# Altium footprint library Connectors.PcbLib: 60 footprints (part 3 of 4)
Each footprint in its own frame and in the unit in brackets; x right, y up, seen from the top. Pads: shape width x height; smd on the part's side, far side on the other; paste and mask are expansions set on the pad; w line width, h text height; cw(c..) or ccw(c..) is an arc to the next point about the centre after c.
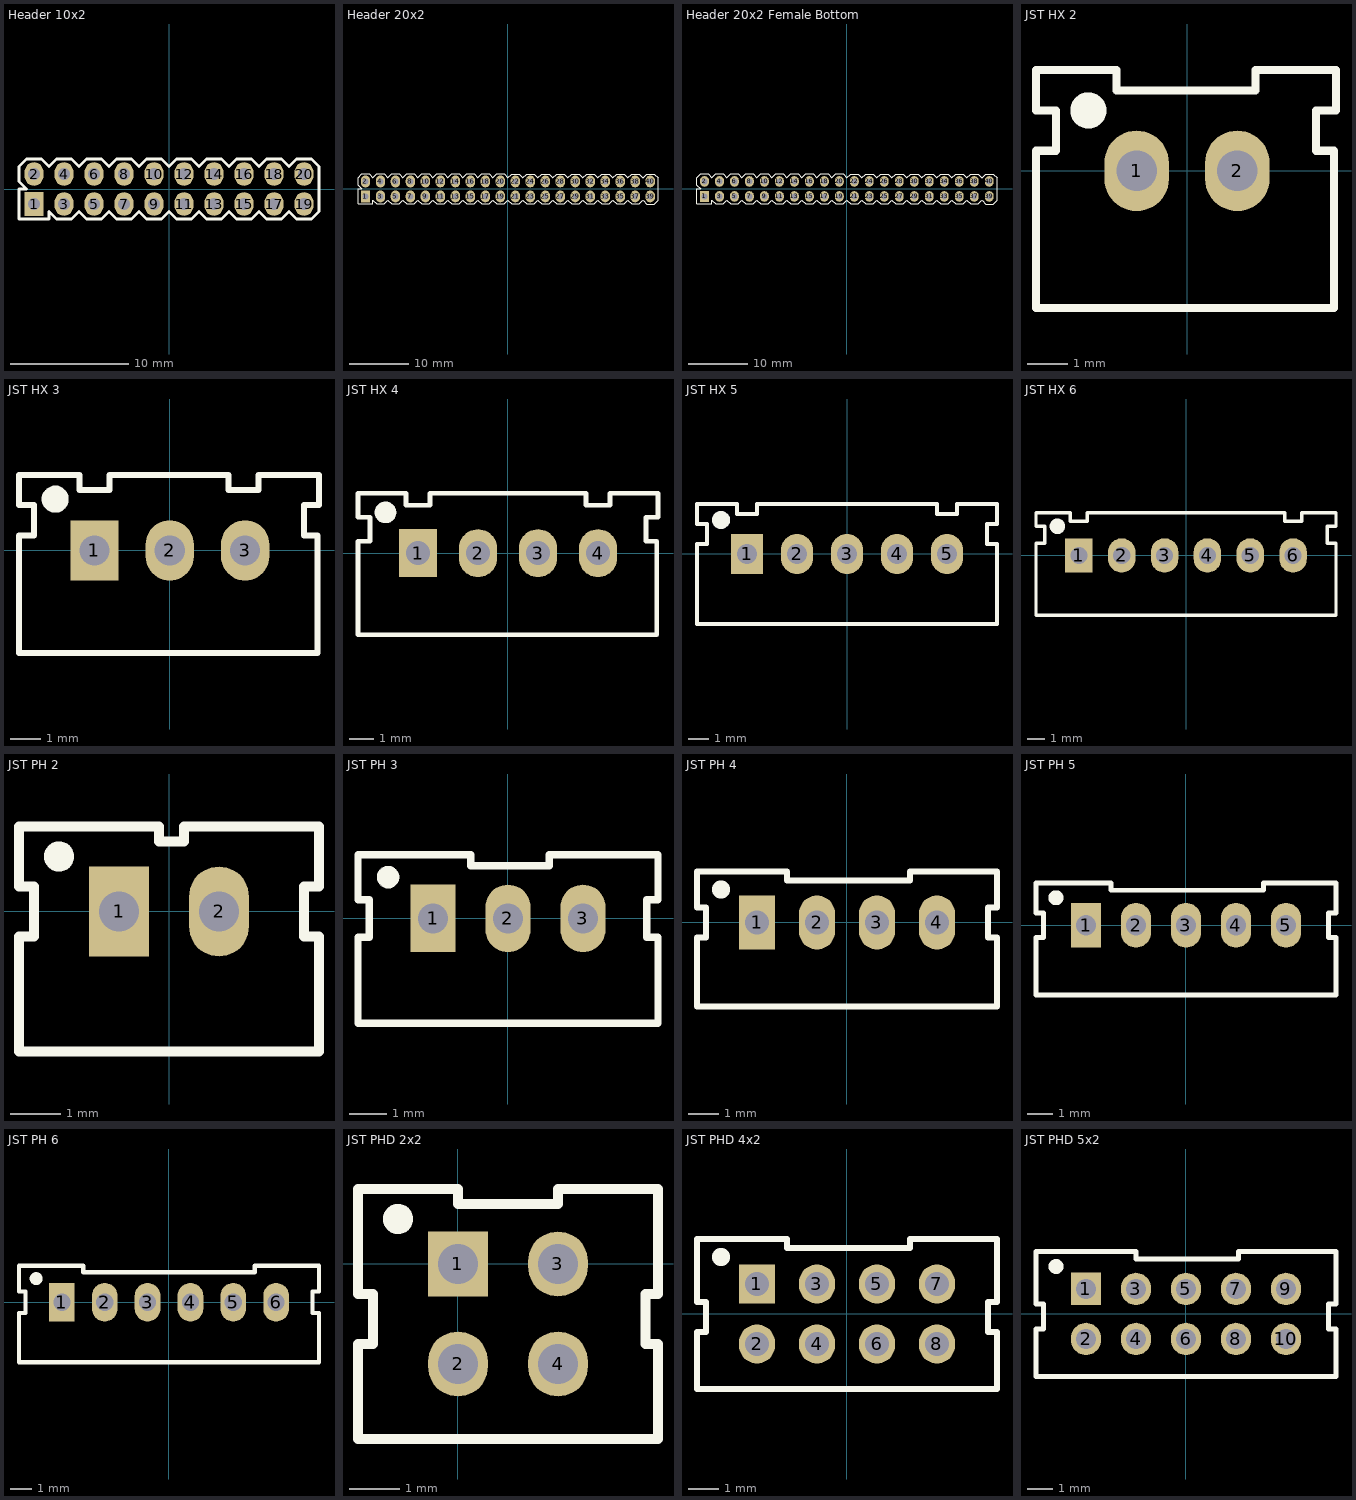
[diagram p2: the footprints below, top view; thin cyan lines are the x and y axes]

## Header 10x2 [mm]
pads (20):
  rect 1.6x2 hole 1: 1(-11.43,-1.27)
  oval 1.6x2 hole 1: 2(-11.43,1.27) 3(-8.89,-1.27) 4(-8.89,1.27) 5(-6.35,-1.27) 6(-6.35,1.27) 7(-3.81,-1.27) 8(-3.81,1.27) 9(-1.27,-1.27) 10(-1.27,1.27) 11(1.27,-1.27) 12(1.27,1.27) 13(3.81,-1.27) 14(3.81,1.27) 15(6.35,-1.27) 16(6.35,1.27) 17(8.89,-1.27) 18(8.89,1.27) 19(11.43,-1.27) 20(11.43,1.27)
Top Overlay:
  lines w0.254: -12.7,-2.54 -10.16,-2.54 -10.16,-1.905 -9.525,-2.54 -8.255,-2.54 -7.62,-1.905 -6.985,-2.54 -5.715,-2.54 -5.08,-1.905 -4.445,-2.54 -3.175,-2.54 -2.54,-1.905 -1.905,-2.54 -0.635,-2.54 0,-1.905 0.635,-2.54 1.905,-2.54 2.54,-1.905 3.175,-2.54 4.445,-2.54 5.08,-1.905 5.715,-2.54 6.985,-2.54 7.62,-1.905 8.255,-2.54 9.525,-2.54 10.16,-1.905 10.795,-2.54 12.065,-2.54 12.7,-1.905 12.7,1.905 12.065,2.54 10.795,2.54 10.16,1.905 9.525,2.54 8.255,2.54 7.62,1.905 6.985,2.54 5.715,2.54 5.08,1.905 4.445,2.54 3.175,2.54 2.54,1.905 1.905,2.54 0.635,2.54 0,1.905 -0.635,2.54 -1.905,2.54 -2.54,1.905 -3.175,2.54 -4.445,2.54 -5.08,1.905 -5.715,2.54 -6.985,2.54 -7.62,1.905 -8.255,2.54 -9.525,2.54 -10.16,1.905 -10.795,2.54 -12.065,2.54 -12.7,1.905 -12.7,0.635 -12.065,0 -12.7,0 -12.7,-2.54
3D body: height 8.5, standoff -3, extent -12.7,-2.54 12.7,2.54

## Header 20x2 [mm]
pads (40):
  rect 1.6x2 hole 1: 1(-24.13,-1.27)
  oval 1.6x2 hole 1: 2(-24.13,1.27) 3(-21.59,-1.27) 4(-21.59,1.27) 5(-19.05,-1.27) 6(-19.05,1.27) 7(-16.51,-1.27) 8(-16.51,1.27) 9(-13.97,-1.27) 10(-13.97,1.27) 11(-11.43,-1.27) 12(-11.43,1.27) 13(-8.89,-1.27) 14(-8.89,1.27) 15(-6.35,-1.27) 16(-6.35,1.27) 17(-3.81,-1.27) 18(-3.81,1.27) 19(-1.27,-1.27) 20(-1.27,1.27) 21(1.27,-1.27) 22(1.27,1.27) 23(3.81,-1.27) 24(3.81,1.27) 25(6.35,-1.27) 26(6.35,1.27) 27(8.89,-1.27) 28(8.89,1.27) 29(11.43,-1.27) 30(11.43,1.27) 31(13.97,-1.27) 32(13.97,1.27) 33(16.51,-1.27) 34(16.51,1.27) 35(19.05,-1.27) 36(19.05,1.27) 37(21.59,-1.27) 38(21.59,1.27) 39(24.13,-1.27) 40(24.13,1.27)
Top Overlay:
  lines w0.2: 0,-1.905 -0.635,-2.54 -1.905,-2.54 -2.54,-1.905 -3.175,-2.54 -4.445,-2.54 -5.08,-1.905 -5.715,-2.54 -6.985,-2.54 -7.62,-1.905 -8.255,-2.54 -9.525,-2.54 -10.16,-1.905 -10.795,-2.54 -12.065,-2.54 -12.7,-1.905 -13.335,-2.54 -14.605,-2.54 -15.24,-1.905 -15.875,-2.54 -17.145,-2.54 -17.78,-1.905 -18.415,-2.54 -19.685,-2.54 -20.32,-1.905 -20.955,-2.54 -22.225,-2.54 -22.86,-1.905 -22.86,-2.54 -25.4,-2.54 -25.4,0 -24.765,0 -25.4,0.635 -25.4,1.905 -24.765,2.54 -23.495,2.54 -22.86,1.905 -22.225,2.54 -20.955,2.54 -20.32,1.905 -19.685,2.54 -18.415,2.54 -17.78,1.905 -17.145,2.54 -15.875,2.54 -15.24,1.905 -14.605,2.54 -13.335,2.54 -12.7,1.905 -12.065,2.54 -10.795,2.54 -10.16,1.905 -9.525,2.54 -8.255,2.54 -7.62,1.905 -6.985,2.54 -5.715,2.54 -5.08,1.905 -4.445,2.54 -3.175,2.54 -2.54,1.905 -1.905,2.54 -0.635,2.54 0,1.905 ; 0.015,-1.915 0.65,-2.55 1.92,-2.55 2.555,-1.915 3.19,-2.55 4.46,-2.55 5.095,-1.915 5.73,-2.55 7,-2.55 7.635,-1.915 8.27,-2.55 9.54,-2.55 10.175,-1.915 10.81,-2.55 12.08,-2.55 12.715,-1.915 13.35,-2.55 14.62,-2.55 15.255,-1.915 15.89,-2.55 17.16,-2.55 17.795,-1.915 18.43,-2.55 19.7,-2.55 20.335,-1.915 20.97,-2.55 22.24,-2.55 22.875,-1.915 ; 0.015,1.895 0.65,2.53 1.92,2.53 2.555,1.895 3.19,2.53 4.46,2.53 5.095,1.895 5.73,2.53 7,2.53 7.635,1.895 8.27,2.53 9.54,2.53 10.175,1.895 10.81,2.53 12.08,2.53 12.715,1.895 13.35,2.53 14.62,2.53 15.255,1.895 15.89,2.53 17.16,2.53 17.795,1.895 18.43,2.53 19.7,2.53 20.335,1.895 20.97,2.53 22.24,2.53 22.875,1.895 ; 22.915,-1.92 23.55,-2.555 24.82,-2.555 25.455,-1.92 25.455,1.89 24.82,2.525 23.55,2.525 22.915,1.89
3D body: height 8.5, standoff -3, extent -25.4,-2.6 25.4,2.48

## Header 20x2 Female Bottom [mm]
pads (40):
  rect 1.5x1.8 hole 1: 1(-24.13,-1.27)
  oval 1.5x1.8 hole 1: 2(-24.13,1.27) 3(-21.59,-1.27) 4(-21.59,1.27) 5(-19.05,-1.27) 6(-19.05,1.27) 7(-16.51,-1.27) 8(-16.51,1.27) 9(-13.97,-1.27) 10(-13.97,1.27) 11(-11.43,-1.27) 12(-11.43,1.27) 13(-8.89,-1.27) 14(-8.89,1.27) 15(-6.35,-1.27) 16(-6.35,1.27) 17(-3.81,-1.27) 18(-3.81,1.27) 19(-1.27,-1.27) 20(-1.27,1.27) 21(1.27,-1.27) 22(1.27,1.27) 23(3.81,-1.27) 24(3.81,1.27) 25(6.35,-1.27) 26(6.35,1.27) 27(8.89,-1.27) 28(8.89,1.27) 29(11.43,-1.27) 30(11.43,1.27) 31(13.97,-1.27) 32(13.97,1.27) 33(16.51,-1.27) 34(16.51,1.27) 35(19.05,-1.27) 36(19.05,1.27) 37(21.59,-1.27) 38(21.59,1.27) 39(24.13,-1.27) 40(24.13,1.27)
Top Overlay:
  lines w0.2: 0,-1.905 -0.635,-2.54 -1.905,-2.54 -2.54,-1.905 -3.175,-2.54 -4.445,-2.54 -5.08,-1.905 -5.715,-2.54 -6.985,-2.54 -7.62,-1.905 -8.255,-2.54 -9.525,-2.54 -10.16,-1.905 -10.795,-2.54 -12.065,-2.54 -12.7,-1.905 -13.335,-2.54 -14.605,-2.54 -15.24,-1.905 -15.875,-2.54 -17.145,-2.54 -17.78,-1.905 -18.415,-2.54 -19.685,-2.54 -20.32,-1.905 -20.955,-2.54 -22.225,-2.54 -22.86,-1.905 -22.86,-2.54 -25.4,-2.54 -25.4,0 -24.765,0 -25.4,0.635 -25.4,1.905 -24.765,2.54 -23.495,2.54 -22.86,1.905 -22.225,2.54 -20.955,2.54 -20.32,1.905 -19.685,2.54 -18.415,2.54 -17.78,1.905 -17.145,2.54 -15.875,2.54 -15.24,1.905 -14.605,2.54 -13.335,2.54 -12.7,1.905 -12.065,2.54 -10.795,2.54 -10.16,1.905 -9.525,2.54 -8.255,2.54 -7.62,1.905 -6.985,2.54 -5.715,2.54 -5.08,1.905 -4.445,2.54 -3.175,2.54 -2.54,1.905 -1.905,2.54 -0.635,2.54 0,1.905 ; 0.015,-1.915 0.65,-2.55 1.92,-2.55 2.555,-1.915 3.19,-2.55 4.46,-2.55 5.095,-1.915 5.73,-2.55 7,-2.55 7.635,-1.915 8.27,-2.55 9.54,-2.55 10.175,-1.915 10.81,-2.55 12.08,-2.55 12.715,-1.915 13.35,-2.55 14.62,-2.55 15.255,-1.915 15.89,-2.55 17.16,-2.55 17.795,-1.915 18.43,-2.55 19.7,-2.55 20.335,-1.915 20.97,-2.55 22.24,-2.55 22.875,-1.915 ; 0.015,1.895 0.65,2.53 1.92,2.53 2.555,1.895 3.19,2.53 4.46,2.53 5.095,1.895 5.73,2.53 7,2.53 7.635,1.895 8.27,2.53 9.54,2.53 10.175,1.895 10.81,2.53 12.08,2.53 12.715,1.895 13.35,2.53 14.62,2.53 15.255,1.895 15.89,2.53 17.16,2.53 17.795,1.895 18.43,2.53 19.7,2.53 20.335,1.895 20.97,2.53 22.24,2.53 22.875,1.895 ; 22.915,-1.92 23.55,-2.555 24.82,-2.555 25.455,-1.92 25.455,1.89 24.82,2.525 23.55,2.525 22.915,1.89
3D body: height 8.5, standoff -3.2, extent -25.4,-2.6 25.4,2.48

## JST HX 2 [mm] "Pitch 2.5mm"
height 7
pads (2):
  oval 1.6x2 hole 1: 1(-1.25,0) 2(1.25,0)
Top Overlay:
  circle w0.5: c-2.45,1.5 r0.2
  lines w0.2: -3.75,-3.4 -3.75,0.5 -3.25,0.5 -3.25,1.5 -3.75,1.5 -3.75,2.5 -1.75,2.5 -1.75,2 -0.75,2 0.7,2 1.7,2 1.7,2.5 3.65,2.5 3.7,2.5 3.7,1.5 3.2,1.5 3.2,0.5 3.65,0.5 3.65,-3.4 -3.75,-3.4
3D body: height 7, standoff -3.4, extent -3.7,-3.375 3.7,2.375

## JST HX 3 [mm] "Pitch 2.5mm"
height 7
pads (3):
  rect 1.6x2 hole 1: 1(-2.5,0)
  oval 1.6x2 hole 1: 2(0,0) 3(2.5,0)
Top Overlay:
  circle w0.5: c-3.8,1.7 r0.2
  lines w0.2: -5,-3.4 -5,0.5 -4.5,0.5 -4.5,1.5 -5,1.5 -5,2.5 -3,2.5 -3,2 -2,2 -2,2.5 1.95,2.5 1.95,2 2.95,2 2.95,2.5 4.9,2.5 4.95,2.5 4.95,1.5 4.45,1.5 4.45,0.5 4.9,0.5 4.9,-3.4 -5,-3.4
3D body: height 7, standoff -3.4, extent -4.95,-3.4 4.95,2.35

## JST HX 4 [mm] "Pitch 2.5mm"
height 7
pads (4):
  rect 1.6x2 hole 1: 1(-3.746,0)
  oval 1.6x2 hole 1: 2(-1.246,0) 3(1.254,0) 4(3.754,0)
Top Overlay:
  circle w0.5: c-5.1,1.7 r0.2
  lines w0.2: -6.247,-3.4 -6.247,0.5 -5.747,0.5 -5.747,1.5 -6.247,1.5 -6.247,2.5 -4.246,2.5 -4.246,2 -3.247,2 -3.247,2.5 3.254,2.5 3.254,2 4.253,2 4.253,2.5 6.204,2.5 6.254,2.5 6.254,1.5 5.753,1.5 5.753,0.5 6.204,0.5 6.204,-3.4 -6.247,-3.4
3D body: height 7, standoff -3.4, extent -6.224,-3.416 6.177,2.334

## JST HX 5 [mm] "Pitch 2.5mm"
height 7
pads (5):
  rect 1.6x2 hole 1: 1(-5,0)
  oval 1.6x2 hole 1: 2(-2.5,0) 3(0,0) 4(2.5,0) 5(5,0)
Top Overlay:
  circle w0.5: c-6.3,1.7 r0.2
  lines w0.2: -7.5,-3.5 7.5,-3.5 7.5,0.5 7,0.5 7,1.5 7.5,1.5 7.5,2.5 5.5,2.5 5.5,2 4.5,2 4.5,2.5 -4.5,2.5 -4.5,2 -5.5,2 -5.5,2.5 -7.5,2.5 -7.5,1.5 -7,1.5 -7,0.5 -7.5,0.5 -7.5,-3.5
3D body: height 7, standoff -3.4, extent -7.45,-3.375 7.45,2.375

## JST HX 6 [mm] "Pitch 2.5mm"
height 7
pads (6):
  rect 1.6x2 hole 1: 1(-6.25,0)
  oval 1.6x2 hole 1: 2(-3.75,0) 3(-1.25,0) 4(1.25,0) 5(3.75,0) 6(6.25,0)
Top Overlay:
  circle w0.5: c-7.5,1.7 r0.2
  lines w0.2: -8.75,-3.5 -8.75,0.7 -8.25,0.7 -8.25,1.7 -8.75,1.7 -8.75,2.5 -6.75,2.5 -6.75,2 -5.75,2 -5.75,2.5 5.75,2.5 5.75,2 6.75,2 6.75,2.5 8.75,2.5 8.75,1.7 8.25,1.7 8.25,0.7 8.75,0.7 8.75,-3.5 -8.75,-3.5
3D body: height 7, standoff -3.4, extent -8.7,-3.375 8.7,2.375

## JST PH 2 [mm] "Pitch 2.0mm"
height 6
pads (2):
  rect 1.2x1.8 hole 0.8: 1(-1,0)
  oval 1.2x1.8 hole 0.8: 2(1,0)
Top Overlay:
  circle w0.4: c-2.2,1.1 r0.1
  lines w0.2: -3,-2.8 3,-2.8 3,-0.5 2.7,-0.5 2.7,0.5 3,0.5 3,1.7 0.3,1.7 0.3,1.4 -0.2,1.4 -0.2,1.7 -3,1.7 -3,0.5 -2.7,0.5 -2.7,-0.5 -3,-0.5 -3,-2.8
3D body: height 6, standoff -3.4, extent -2.95,-2.8 2.95,1.7

## JST PH 3 [mm] "Pitch 2.0mm"
height 6
pads (3):
  rect 1.2x1.8 hole 0.8: 1(-2,0)
  oval 1.2x1.8 hole 0.8: 2(0,0) 3(2,0)
Top Overlay:
  circle w0.4: c-3.2,1.1 r0.1
  lines w0.2: -4,-2.8 -4,-0.5 -3.7,-0.5 -3.7,0.5 -4,0.5 -4,1.7 -1,1.7 -1,1.4 1.1,1.4 1.1,1.7 4,1.7 4,0.5 3.7,0.5 3.7,-0.5 4,-0.5 4,-2.8 -4,-2.8
3D body: height 6, standoff -3, extent -3.95,-2.75 3.95,1.75

## JST PH 4 [mm] "Pitch 2.0mm"
height 6
pads (4):
  rect 1.2x1.8 hole 0.8: 1(-3,0)
  oval 1.2x1.8 hole 0.8: 2(-1,0) 3(1,0) 4(3,0)
Top Overlay:
  circle w0.4: c-4.2,1.1 r0.1
  lines w0.2: -5,-2.8 -5,-0.5 -4.7,-0.5 -4.7,0.5 -5,0.5 -5,1.7 -2,1.7 -2,1.4 2.1,1.4 2.1,1.7 5,1.7 5,0.5 4.7,0.5 4.7,-0.5 5,-0.5 5,-2.8 -5,-2.8
3D body: height 6, standoff -3, extent -4.95,-2.85 4.95,1.65

## JST PH 5 [mm] "Pitch 2.0mm"
height 6
pads (5):
  rect 1.2x1.8 hole 0.8: 1(-4,0)
  oval 1.2x1.8 hole 0.8: 2(-2,0) 3(0,0) 4(2,0) 5(4,0)
Top Overlay:
  circle w0.4: c-5.2,1.1 r0.1
  lines w0.2: -6,-2.8 6,-2.8 6,-0.5 5.7,-0.5 5.7,0.5 6,0.5 6,1.7 3.1,1.7 3.1,1.4 -3,1.4 -3,1.7 -6,1.7 -6,0.5 -5.7,0.5 -5.7,-0.5 -6,-0.5 -6,-2.8
3D body: height 6, standoff -3.4, extent -5.9,-2.85 6,1.65

## JST PH 6 [mm] "Pitch 2.0mm"
height 6
pads (6):
  rect 1.2x1.8 hole 0.8: 1(-5,0)
  oval 1.2x1.8 hole 0.8: 2(-3,0) 3(-1,0) 4(1,0) 5(3,0) 6(5,0)
Top Overlay:
  circle w0.4: c-6.2,1.1 r0.1
  lines w0.2: -7,-2.8 7,-2.8 7,-0.5 6.7,-0.5 6.7,0.5 7,0.5 7,1.7 4,1.7 4,1.4 -4,1.4 -4,1.7 -7,1.7 -7,0.5 -6.7,0.5 -6.7,-0.5 -7,-0.5 -7,-2.8
3D body: height 6, standoff -3, extent -6.9,-2.85 7,1.65

## JST PHD 2x2 [mm] "Pitch 2.0mm"
height 6
pads (4):
  rect 1.2x1.3 hole 0.8: 1(0,0)
  oval 1.2x1.3 hole 0.8: 2(0,-2) 3(2,0) 4(2,-2)
Top Overlay:
  circle w0.4: c-1.2,0.9 r0.1
  lines w0.2: -2,-3.5 -2,-1.6 -1.7,-1.6 -1.7,-0.6 -2,-0.6 -2,1.5 0,1.5 0,1.2 2,1.2 2,1.5 4,1.5 4,-0.6 3.75,-0.6 3.75,-1.6 4,-1.6 4,-3.5 -2,-3.5
3D body: height 6.55, standoff -2.75, extent -2,-3.5 4,1.5

## JST PHD 4x2 [mm] "Pitch 2.0mm"
height 6
pads (8):
  rect 1.2x1.3 hole 0.8: 1(-3,1)
  oval 1.2x1.3 hole 0.8: 2(-3,-1) 3(-1,1) 4(-1,-1) 5(1,1) 6(1,-1) 7(3,1) 8(3,-1)
Top Overlay:
  circle w0.4: c-4.2,1.9 r0.1
  lines w0.2: -5,-2.5 5,-2.5 5,-0.6 4.7,-0.6 4.7,0.4 5,0.4 5,2.5 2.1,2.5 2.1,2.2 -2,2.2 -2,2.5 -5,2.5 -5,0.4 -4.7,0.4 -4.7,-0.6 -5,-0.6 -5,-2.5
3D body: height 6.5, standoff -2, extent -4.95,-2.5 4.95,2.5

## JST PHD 5x2 [mm] "Pitch 2.0mm"
height 6
pads (10):
  rect 1.2x1.3 hole 0.8: 1(-4,1)
  oval 1.2x1.3 hole 0.8: 2(-4,-1) 3(-2,1) 4(-2,-1) 5(0,1) 6(0,-1) 7(2,1) 8(2,-1) 9(4,1) 10(4,-1)
Top Overlay:
  circle w0.4: c-5.2,1.9 r0.1
  lines w0.2: -6,-2.5 -6,-0.6 -5.7,-0.6 -5.7,0.4 -6,0.4 -6,2.5 -2,2.5 -2,2.2 2.1,2.2 2.1,2.5 6,2.5 6,0.4 5.7,0.4 5.7,-0.6 6,-0.6 6,-2.5 -6,-2.5
3D body: height 6.5, standoff -2, extent -5.95,-2.5 5.95,2.5